# Altium footprint library UMW_PKG_SOT-89-3.PcbLib: 1 footprints
Each footprint in its own frame and in the unit in brackets; x right, y up, seen from the top. Pads: shape width x height; smd on the part's side, far side on the other; paste and mask are expansions set on the pad; w line width, h text height; cw(c..) or ccw(c..) is an arc to the next point about the centre after c.
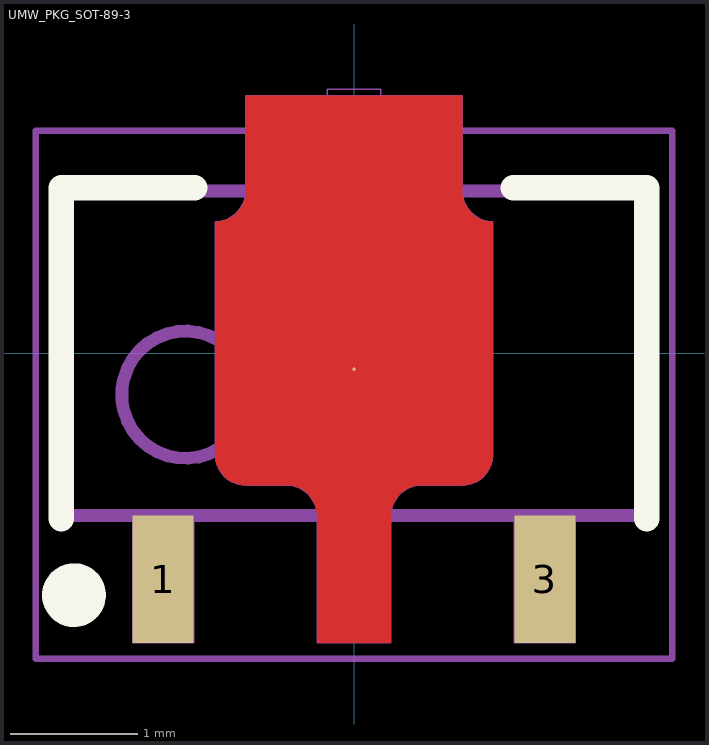
[diagram p0: the footprint, top view; thin cyan lines are the x and y axes]

## UMW_PKG_SOT-89-3 [mm]
height 1.55
pads (3):
  rect 0.48x1 smd: 1(-1.5,-1.775) 3(1.5,-1.775)
  round 0.025 smd: 2(0,-0.125)
Top Layer:
  region: -0.53,-1.035 -0.506,-1.036 -0.46,-1.045 -0.417,-1.063 -0.378,-1.089 -0.344,-1.123 -0.318,-1.162 -0.3,-1.205 -0.291,-1.251 -0.29,-1.275 -0.29,-2.275 0.29,-2.275 0.29,-1.275 0.291,-1.251 0.3,-1.205 0.318,-1.162 0.344,-1.123 0.378,-1.089 0.417,-1.063 0.46,-1.045 0.506,-1.036 0.53,-1.035 0.85,-1.035 0.874,-1.035 0.92,-1.026 0.964,-1.008 1.003,-0.981 1.036,-0.948 1.063,-0.909 1.081,-0.865 1.09,-0.819 1.09,-0.795 1.09,1.035 1.066,1.036 1.02,1.045 0.977,1.063 0.938,1.089 0.904,1.122 0.878,1.161 0.86,1.205 0.851,1.251 0.85,1.275 0.85,2.025 -0.21,2.025 -0.85,2.025 -0.85,1.275 -0.851,1.251 -0.86,1.205 -0.878,1.161 -0.904,1.122 -0.938,1.089 -0.977,1.063 -1.02,1.045 -1.066,1.036 -1.09,1.035 -1.09,-0.795 -1.09,-0.819 -1.081,-0.865 -1.063,-0.909 -1.036,-0.948 -1.003,-0.981 -0.964,-1.008 -0.92,-1.026 -0.874,-1.035 -0.85,-1.035
Top Overlay:
  circle w0.25: c-2.2,-1.9 r0.125
  lines w0.2: -2.3,-1.3 -2.3,1.3 -1.25,1.3 ; 1.25,1.3 2.3,1.3 2.3,-1.3
Mechanical 13:
  circle w0.1: c-1.325,-0.325 r0.5
  lines w0.01: -0.29,-1.275 ccw(c-0.53,-1.275) -0.53,-1.035 -0.85,-1.035 cw(c-0.85,-0.795) -1.09,-0.795 -1.09,1.035 ccw(c-1.09,1.275) -0.85,1.275 -0.85,2.025 -0.21,2.025 ; -0.29,-1.275 -0.29,-2.275 0.29,-2.275 0.29,-1.275 ; -0.29,-1.275 0.29,-1.275 ; -0.21,2.025 -0.21,2.075 0.21,2.075 0.21,2.025 ; -0.21,2.025 0.21,2.025 ; -0.21,2.025 -0.21,2.025 ; 0.21,2.025 0.85,2.025 0.85,1.275 ccw(c1.09,1.275) 1.09,1.035 1.09,-0.795 cw(c0.85,-0.795) 0.85,-1.035 0.53,-1.035 ccw(c0.53,-1.275) 0.29,-1.275 ; -1.74,-2.275 -1.74,-1.275 -1.26,-1.275 -1.26,-2.275 -1.74,-2.275 ; 1.26,-2.275 1.74,-2.275 1.74,-1.275 1.26,-1.275 1.26,-2.275
  lines w0.1: -2.275,-1.275 2.275,-1.275 2.275,1.275 -2.275,1.275 -2.275,-1.275
Mechanical 15:
  lines w0.05: -2.5,-2.4 2.5,-2.4 2.5,1.75 -2.5,1.75 -2.5,-2.4
  lines w0.1: -0.5,0 0.5,0 ; 0,-0.5 0,0.5
3D body: height 1.55, standoff 0, extent -2.275,-1.275 2.275,1.275